# Altium footprint library Passive-Ind.PcbLib: 61 footprints (part 2 of 4)
Each footprint in its own frame and in the unit in brackets; x right, y up, seen from the top. Pads: shape width x height; smd on the part's side, far side on the other; paste and mask are expansions set on the pad; w line width, h text height; cw(c..) or ccw(c..) is an arc to the next point about the centre after c.
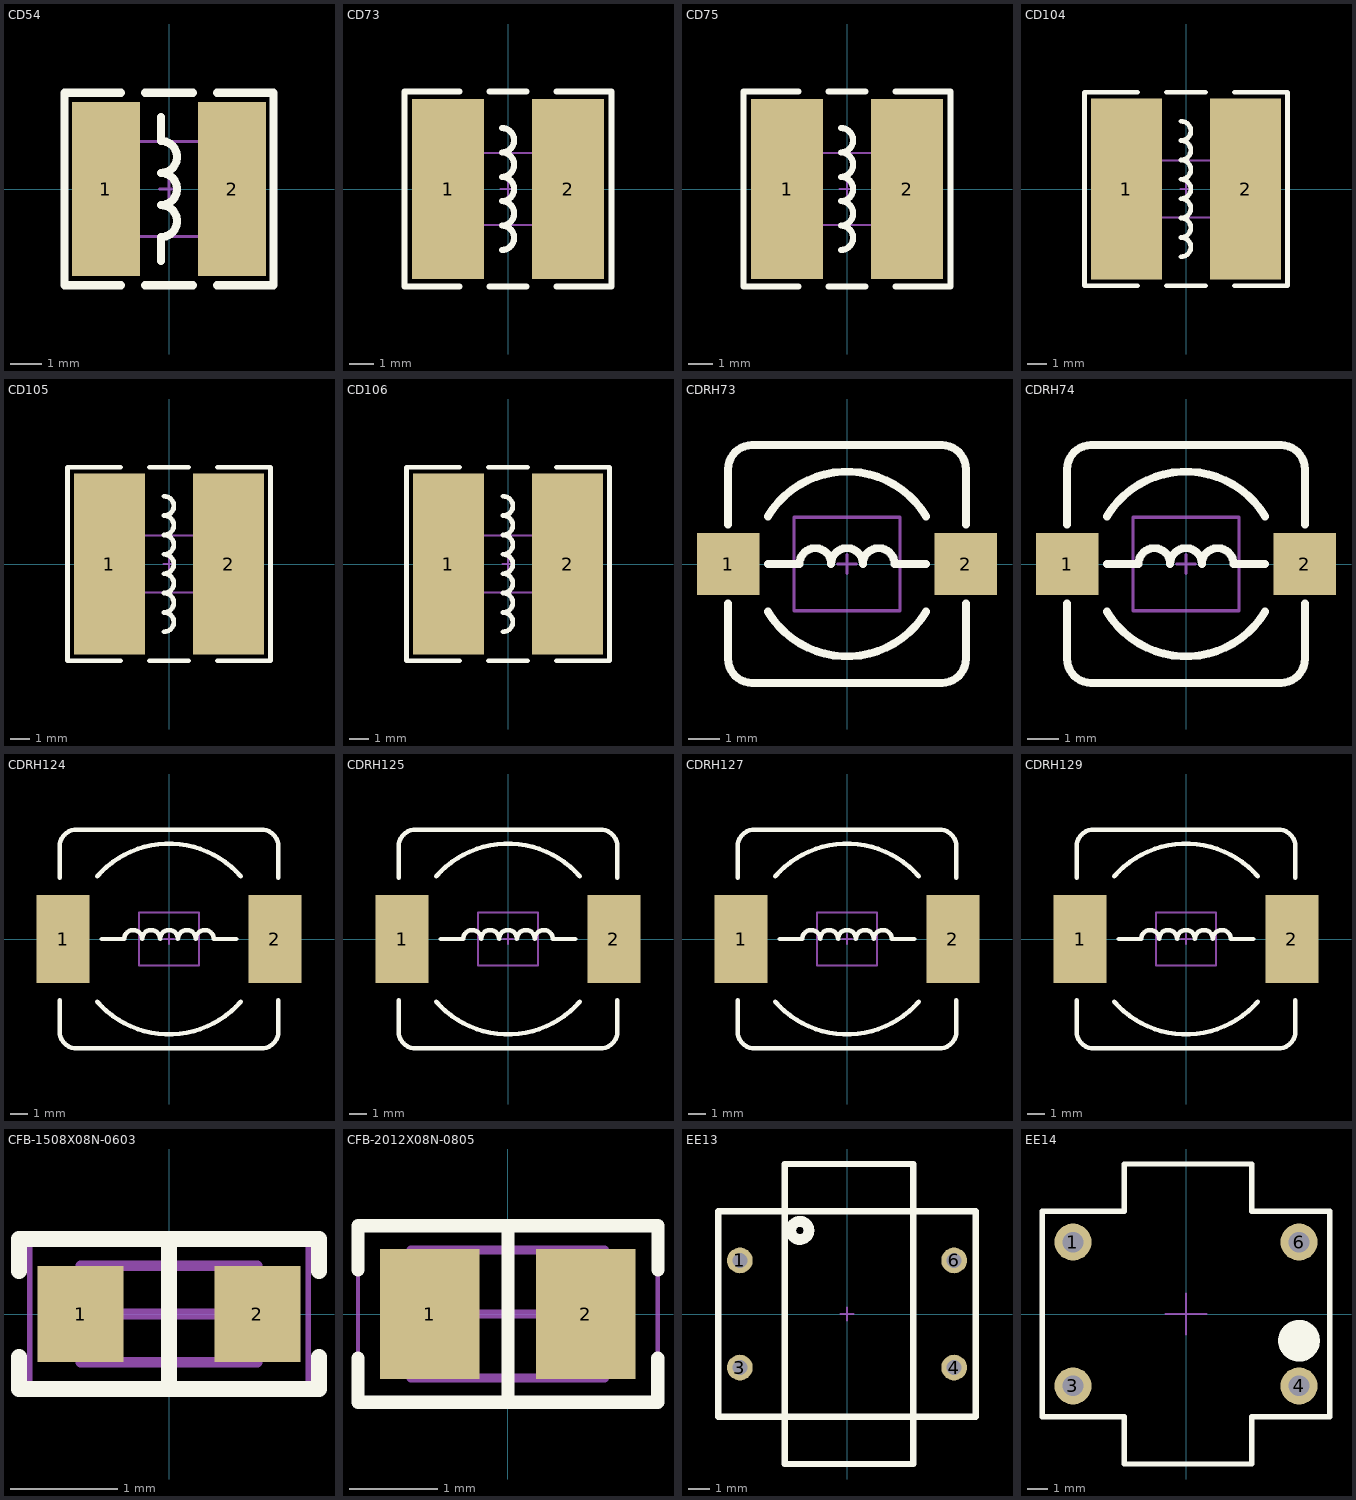
[diagram p1: the footprints below, top view; thin cyan lines are the x and y axes]

## CD54 [mm] "5.8*5.2*4.5mm（长宽高）"
pads (2):
  rect 2.15x5.5 smd: 1(-2,0) 2(2,0)
Top Overlay:
  lines w0.254: -1.524,-3.048 -3.302,-3.048 -3.302,3.048 -1.524,3.048 ; -0.762,-3.048 0.762,-3.048 ; -0.762,3.048 0.762,3.048 ; -0.254,-2.286 -0.254,-1.524 ccw(c-0.254,-1.016) -0.254,-0.508 ccw(c-0.254,0) -0.254,0.508 ccw(c-0.254,1.016) -0.254,1.524 -0.254,2.286 ; 1.524,-3.048 3.302,-3.048 3.302,3.048 1.524,3.048
Top Component Outline:
  lines w0.1: -1.7,-1.5 -1.7,1.5 1.7,1.5 1.7,-1.5 -1.7,-1.5
Top Component Center:
  lines w0.1: -0.3,0 0.3,0 ; 0,-0.3 0,0.3
Top Value:
  text "'.Comment'" at -2.754,-0.38 h1.27
Top Designator:
  text ".Designator" at -3.774,-0.319 h1.52
3D body "CD54.STEP": height 4, standoff 0, extent -2.747,-2.333 3.001,2.667

## CD73 [mm] "7.8*7*3.5mm（长宽高）"
pads (2):
  rect 3x7.5 smd: 1(-2.5,0) 2(2.5,0)
Top Overlay:
  lines w0.254: -2.032,-4.064 -4.318,-4.064 -4.318,4.064 -2.032,4.064 ; -0.762,-4.064 0.762,-4.064 ; -0.762,4.064 0.762,4.064 ; -0.254,-2.54 ccw(c-0.254,-2.032) -0.254,-1.524 ccw(c-0.254,-1.016) -0.254,-0.508 ccw(c-0.254,0) -0.254,0.508 ccw(c-0.254,1.016) -0.254,1.524 ccw(c-0.254,2.032) -0.254,2.54 ; 2.032,-4.064 4.318,-4.064 4.318,4.064 2.032,4.064
Top Component Outline:
  lines w0.1: -1.7,-1.5 -1.7,1.5 1.7,1.5 1.7,-1.5 -1.7,-1.5
Top Component Center:
  lines w0.1: -0.3,0 0.3,0 ; 0,-0.3 0,0.3
Top Value:
  text "'.Comment'" at -2.754,-0.38 h1.27
Top Designator:
  text ".Designator" at -3.774,-0.319 h1.52
3D body "CD73.STEP": height 3.75, standoff 0, extent -3.849,-3.19 3.849,3.81

## CD75 [mm] "7.8*7*5mm（长宽高）"
pads (2):
  rect 3x7.5 smd: 1(-2.5,0) 2(2.5,0)
Top Overlay:
  lines w0.254: -2.032,-4.064 -4.318,-4.064 -4.318,4.064 -2.032,4.064 ; -0.762,-4.064 0.762,-4.064 ; -0.762,4.064 0.762,4.064 ; -0.254,-2.54 ccw(c-0.254,-2.032) -0.254,-1.524 ccw(c-0.254,-1.016) -0.254,-0.508 ccw(c-0.254,0) -0.254,0.508 ccw(c-0.254,1.016) -0.254,1.524 ccw(c-0.254,2.032) -0.254,2.54 ; 2.032,-4.064 4.318,-4.064 4.318,4.064 2.032,4.064
Top Component Outline:
  lines w0.1: -1.7,-1.5 1.7,-1.5 1.7,1.5 -1.7,1.5 -1.7,-1.5
Top Component Center:
  lines w0.1: -0.3,0 0.3,0 ; 0,-0.3 0,0.3
Top Value:
  text "'.Comment'" at -2.754,-0.38 h1.27
Top Designator:
  text ".Designator" at -3.774,-0.319 h1.52
3D body "CD75.STEP": height 5.15, standoff 0, extent -3.849,-3.444 3.849,3.556

## CD104 [mm] "10*9*4mm（长宽高）"
pads (2):
  rect 3.75x9.5 smd: 1(-3.125,0) 2(3.125,0)
Top Overlay:
  lines w0.254: -2.54,-5.08 -5.334,-5.08 -5.334,5.08 -2.54,5.08 ; -1.016,-5.08 1.016,-5.08 ; -1.016,5.08 1.016,5.08 ; -0.254,-3.556 ccw(c-0.254,-3.048) -0.254,-2.54 ccw(c-0.254,-2.032) -0.254,-1.524 ccw(c-0.254,-1.016) -0.254,-0.508 ccw(c-0.254,0) -0.254,0.508 ccw(c-0.254,1.016) -0.254,1.524 ccw(c-0.254,2.032) -0.254,2.54 ccw(c-0.254,3.048) -0.254,3.556 ; 2.54,-5.08 5.334,-5.08 5.334,5.08 2.54,5.08
Top Component Outline:
  lines w0.1: -1.7,-1.5 -1.7,1.5 1.7,1.5 1.7,-1.5 -1.7,-1.5
Top Component Center:
  lines w0.1: -0.3,0 0.3,0 ; 0,-0.3 0,0.3
Top Value:
  text "'.Comment'" at -2.754,-0.38 h1.27
Top Designator:
  text ".Designator" at -3.774,-0.319 h1.52
3D body "CD104.STEP": height 4.7, standoff 0, extent -4.7,-4.174 5.208,4.826

## CD105 [mm] "10*9*5.4mm（长宽高）"
pads (2):
  rect 3.75x9.5 smd: 1(-3.125,0) 2(3.125,0)
Top Overlay:
  lines w0.254: -2.54,-5.08 -5.334,-5.08 -5.334,5.08 -2.54,5.08 ; -1.016,-5.08 1.016,-5.08 ; -1.016,5.08 1.016,5.08 ; -0.254,-3.556 ccw(c-0.254,-3.048) -0.254,-2.54 ccw(c-0.254,-2.032) -0.254,-1.524 ccw(c-0.254,-1.016) -0.254,-0.508 ccw(c-0.254,0) -0.254,0.508 ccw(c-0.254,1.016) -0.254,1.524 ccw(c-0.254,2.032) -0.254,2.54 ccw(c-0.254,3.048) -0.254,3.556 ; 2.54,-5.08 5.334,-5.08 5.334,5.08 2.54,5.08
Top Component Outline:
  lines w0.1: -1.7,-1.5 -1.7,1.5 1.7,1.5 1.7,-1.5 -1.7,-1.5
Top Component Center:
  lines w0.1: -0.3,0 0.3,0 ; 0,-0.3 0,0.3
Top Value:
  text "'.Comment'" at -2.754,-0.38 h1.27
Top Designator:
  text ".Designator" at -3.774,-0.319 h1.52
3D body "CD105.STEP": height 5.5, standoff 0, extent -5.208,-4.428 4.7,4.572

## CD106 [mm] "10*9*6.5mm（长宽高）"
pads (2):
  rect 3.75x9.5 smd: 1(-3.125,0) 2(3.125,0)
Top Overlay:
  lines w0.254: -2.54,-5.08 -5.334,-5.08 -5.334,5.08 -2.54,5.08 ; -1.016,-5.08 1.016,-5.08 ; -1.016,5.08 1.016,5.08 ; -0.254,-3.556 ccw(c-0.254,-3.048) -0.254,-2.54 ccw(c-0.254,-2.032) -0.254,-1.524 ccw(c-0.254,-1.016) -0.254,-0.508 ccw(c-0.254,0) -0.254,0.508 ccw(c-0.254,1.016) -0.254,1.524 ccw(c-0.254,2.032) -0.254,2.54 ccw(c-0.254,3.048) -0.254,3.556 ; 2.54,-5.08 5.334,-5.08 5.334,5.08 2.54,5.08
Top Component Outline:
  lines w0.1: -1.7,-1.5 -1.7,1.5 1.7,1.5 1.7,-1.5 -1.7,-1.5
Top Component Center:
  lines w0.1: -0.3,0 0.3,0 ; 0,-0.3 0,0.3
Top Value:
  text "'.Comment'" at -2.754,-0.38 h1.27
Top Designator:
  text ".Designator" at -3.774,-0.319 h1.52
3D body "CD106.STEP": height 6.3, standoff 0, extent -5.08,-4.5 4.829,4.5

## CDRH73 [mm] "7.3*7.3*3.4mm（长宽高）"
pads (2):
  rect 2x2 smd: 1(-3.81,0) 2(3.81,0)
Top Overlay:
  lines w0.254: -3.81,-1.27 -3.81,-3.048 ccw(c-3.048,-3.048) -3.048,-3.81 3.048,-3.81 ccw(c3.048,-3.048) 3.81,-3.048 3.81,-1.27 ; -3.81,1.27 -3.81,3.048 cw(c-3.048,3.048) -3.048,3.81 3.048,3.81 cw(c3.048,3.048) 3.81,3.048 3.81,1.27 ; -2.54,-1.524 ccw(c0,0) 2.54,-1.524 ; -2.54,0 -1.524,0 cw(c-1.016,0) -0.508,0 cw(c0,0) 0.508,0 cw(c1.016,0) 1.524,0 2.54,0 ; -2.54,1.524 cw(c0,0) 2.54,1.524
Top Component Outline:
  lines w0.1: -1.7,-1.5 -1.7,1.5 1.7,1.5 1.7,-1.5 -1.7,-1.5
Top Component Center:
  lines w0.1: -0.3,0 0.3,0 ; 0,-0.3 0,0.3
Top Value:
  text "'.Comment'" at -2.754,-0.38 h1.27
Top Designator:
  text ".Designator" at -3.774,-0.319 h1.52
3D body "CDRH73.STEP": height 3.65, standoff 0, extent -3.49,-3.65 3.81,3.65

## CDRH74 [mm] "7.3*7.3*4.5mm（长宽高）"
pads (2):
  rect 2x2 smd: 1(-3.81,0) 2(3.81,0)
Top Overlay:
  lines w0.254: -3.81,-1.27 -3.81,-3.048 ccw(c-3.048,-3.048) -3.048,-3.81 3.048,-3.81 ccw(c3.048,-3.048) 3.81,-3.048 3.81,-1.27 ; -3.81,1.27 -3.81,3.048 cw(c-3.048,3.048) -3.048,3.81 3.048,3.81 cw(c3.048,3.048) 3.81,3.048 3.81,1.27 ; -2.54,-1.524 ccw(c0,0) 2.54,-1.524 ; -2.54,0 -1.524,0 cw(c-1.016,0) -0.508,0 cw(c0,0) 0.508,0 cw(c1.016,0) 1.524,0 2.54,0 ; -2.54,1.524 cw(c0,0) 2.54,1.524
Top Component Outline:
  lines w0.1: -1.7,-1.5 -1.7,1.5 1.7,1.5 1.7,-1.5 -1.7,-1.5
Top Component Center:
  lines w0.1: -0.3,0 0.3,0 ; 0,-0.3 0,0.3
Top Value:
  text "'.Comment'" at -2.754,-0.38 h1.27
Top Designator:
  text ".Designator" at -3.774,-0.319 h1.52
3D body "CDRH74.STEP": height 4.5, standoff 0, extent -3.65,-3.617 3.65,3.683

## CDRH124 [mm] "12*12*4.5mm（长宽高）"
pads (2):
  rect 3x5 smd: 1(-6,0) 2(6,0)
Top Overlay:
  lines w0.254: -6.2,-3.475 -6.2,-5.23 ccw(c-5.23,-5.23) -5.23,-6.2 5.23,-6.2 ccw(c5.23,-5.23) 6.2,-5.23 6.2,-3.475 ; -6.2,3.475 -6.2,5.23 cw(c-5.23,5.23) -5.23,6.2 5.23,6.2 cw(c5.23,5.23) 6.2,5.23 6.2,3.475 ; -4.064,-3.556 ccw(c0,0) 4.064,-3.556 ; -4.064,3.556 cw(c0,0) 4.064,3.556 ; -3.81,0 -2.54,0 cw(c-2.032,0) -1.524,0 cw(c-1.016,0) -0.508,0 cw(c0,0) 0.508,0 cw(c1.016,0) 1.524,0 cw(c2.032,0) 2.54,0 3.81,0
Top Component Outline:
  lines w0.1: -1.7,-1.5 -1.7,1.5 1.7,1.5 1.7,-1.5 -1.7,-1.5
Top Component Center:
  lines w0.1: -0.3,0 0.3,0 ; 0,-0.3 0,0.3
Top Value:
  text "'.Comment'" at -2.754,-0.38 h1.27
Top Designator:
  text ".Designator" at -3.774,-0.319 h1.52
3D body "CDRH124.STEP": height 4.55, standoff 0.05, extent -5.873,-6.031 6.127,5.969

## CDRH125 [mm] "12*12*5mm（长宽高）"
pads (2):
  rect 3x5 smd: 1(-6,0) 2(6,0)
Top Overlay:
  lines w0.254: -6.2,-3.475 -6.2,-5.23 ccw(c-5.23,-5.23) -5.23,-6.2 5.23,-6.2 ccw(c5.23,-5.23) 6.2,-5.23 6.2,-3.475 ; -6.2,3.475 -6.2,5.23 cw(c-5.23,5.23) -5.23,6.2 5.23,6.2 cw(c5.23,5.23) 6.2,5.23 6.2,3.475 ; -4.064,-3.556 ccw(c0,0) 4.064,-3.556 ; -4.064,3.556 cw(c0,0) 4.064,3.556 ; -3.81,0 -2.54,0 cw(c-2.032,0) -1.524,0 cw(c-1.016,0) -0.508,0 cw(c0,0) 0.508,0 cw(c1.016,0) 1.524,0 cw(c2.032,0) 2.54,0 3.81,0
Top Component Outline:
  lines w0.1: -1.7,-1.5 1.7,-1.5 1.7,1.5 -1.7,1.5 -1.7,-1.5
Top Component Center:
  lines w0.1: -0.3,0 0.3,0 ; 0,-0.3 0,0.3
Top Value:
  text "'.Comment'" at -2.754,-0.38 h1.27
Top Designator:
  text ".Designator" at -3.774,-0.319 h1.52
3D body "CDRH125.STEP": height 5.05, standoff 0.05, extent -5.873,-5.969 6.127,6.031

## CDRH127 [mm] "12*12*8mm（长宽高）"
pads (2):
  rect 3x5 smd: 1(-6,0) 2(6,0)
Top Overlay:
  lines w0.254: -6.2,-3.475 -6.2,-5.23 ccw(c-5.23,-5.23) -5.23,-6.2 5.23,-6.2 ccw(c5.23,-5.23) 6.2,-5.23 6.2,-3.475 ; -6.2,3.475 -6.2,5.23 cw(c-5.23,5.23) -5.23,6.2 5.23,6.2 cw(c5.23,5.23) 6.2,5.23 6.2,3.475 ; -4.064,-3.556 ccw(c0,0) 4.064,-3.556 ; -4.064,3.556 cw(c0,0) 4.064,3.556 ; -3.81,0 -2.54,0 cw(c-2.032,0) -1.524,0 cw(c-1.016,0) -0.508,0 cw(c0,0) 0.508,0 cw(c1.016,0) 1.524,0 cw(c2.032,0) 2.54,0 3.81,0
Top Component Outline:
  lines w0.1: -1.7,-1.5 -1.7,1.5 1.7,1.5 1.7,-1.5 -1.7,-1.5
Top Component Center:
  lines w0.1: -0.3,0 0.3,0 ; 0,-0.3 0,0.3
Top Value:
  text "'.Comment'" at -2.754,-0.38 h1.27
Top Designator:
  text ".Designator" at -3.774,-0.319 h1.52
3D body "CDRH127.STEP": height 7.8, standoff 0, extent -5.873,-6.031 6.127,5.969

## CDRH129 [mm] "12*12*9.5mm（长宽高）"
pads (2):
  rect 3x5 smd: 1(-6,0) 2(6,0)
Top Overlay:
  lines w0.254: -6.2,-3.475 -6.2,-5.23 ccw(c-5.23,-5.23) -5.23,-6.2 5.23,-6.2 ccw(c5.23,-5.23) 6.2,-5.23 6.2,-3.475 ; -6.2,3.475 -6.2,5.23 cw(c-5.23,5.23) -5.23,6.2 5.23,6.2 cw(c5.23,5.23) 6.2,5.23 6.2,3.475 ; -4.064,-3.556 ccw(c0,0) 4.064,-3.556 ; -4.064,3.556 cw(c0,0) 4.064,3.556 ; -3.81,0 -2.54,0 cw(c-2.032,0) -1.524,0 cw(c-1.016,0) -0.508,0 cw(c0,0) 0.508,0 cw(c1.016,0) 1.524,0 cw(c2.032,0) 2.54,0 3.81,0
Top Component Outline:
  lines w0.1: -1.7,-1.5 1.7,-1.5 1.7,1.5 -1.7,1.5 -1.7,-1.5
Top Component Center:
  lines w0.1: -0.3,0 0.3,0 ; 0,-0.3 0,0.3
Top Value:
  text "'.Comment'" at -2.754,-0.38 h1.27
Top Designator:
  text ".Designator" at -3.774,-0.319 h1.52
3D body "CDRH129.STEP": height 9.65, standoff 0.05, extent -6.127,-5.904 5.873,6.096

## CFB-1508X08N-0603 [mm] "Chip Inductor, 2-Leads, Body 1.55x0.80mm, IPC Medium Density"
height 0.8
pads (2):
  rect 0.8x0.9 smd: 1(-0.825,0) 2(0.825,0)
Top Overlay:
  lines w0.15: -1.4,-0.4 -1.4,-0.7 1.4,-0.7 1.4,-0.4 ; -1.4,0.4 -1.4,0.7 1.4,0.7 1.4,0.4 ; 0,-0.7 0,0.7
Top Courtyard:
  lines w0.05: -1.3,-0.7 -1.3,0.7 1.3,0.7 1.3,-0.7 -1.3,-0.7
  lines w0.1: -0.45,0 0.45,0 ; 0,-0.45 0,0.45
Top Assembly (Mech20):
  lines w0.1: -0.825,-0.45 -0.825,0.45 0.825,0.45 0.825,-0.45 -0.825,-0.45
3D body "0603L.STEP": height 0.8, standoff 0, extent -0.8,-0.419 0.8,0.381

## CFB-2012X08N-0805 [mm] "Chip Inductor, 2-Leads, Body 2.00x1.25mm, IPC Medium Density"
height 0.85
pads (2):
  rect 1.13x1.47 smd: 1(-0.885,0) 2(0.885,0)
Top Overlay:
  lines w0.152: -1.7,-0.5 -1.7,-1 1.7,-1 1.7,-0.5 ; -1.7,0.5 -1.7,1 1.704,1 1.704,0.504 ; 0.002,-0.998 0.002,1
Top Value:
  text "'.Comment'" at -3.468,-0.479 h1.6
Top Designator:
  text ".Designator" at -3.964,-0.335 h1.6
Top Courtyard:
  lines w0.05: -1.7,-1 1.7,-1 1.7,1 -1.7,1 -1.7,-1
  lines w0.1: -0.5,0 0.5,0 ; 0,-0.5 0,0.5
Top Assembly (Mech20):
  lines w0.1: -1.1,-0.725 1.1,-0.725 1.1,0.725 -1.1,0.725 -1.1,-0.725
3D body "0805L.STEP": height 0.9, standoff 0, extent -1,-0.6 1,0.6

## EE13 [mm] "600,1:1音频变压器"
pads (4):
  round 1.2 hole 0.7: 1(-5,2.5) 3(-5,-2.5) 4(5,-2.5) 6(5,2.5)
Top Overlay:
  circle w0.5: c-2.2,3.9 r0.424
  lines w0.3: -6,-4.8 -6,4.8 6,4.8 6,-4.8 -6,-4.8 ; -2.9,-7 -2.9,7 3.1,7 3.1,-7 -2.9,-7
Top Component Outline:
  lines w0.1: -6,-4.8 -2.9,-4.8 -2.9,-7 3.1,-7 3.1,-4.8 6,-4.8 6,4.8 3.1,4.8 3.1,7 -2.9,7 -2.9,4.8 -6,4.8 -6,-4.8
Top Component Center:
  lines w0.1: -0.3,0 0.3,0 ; 0,-0.3 0,0.3
Top Value:
  text "'.Comment'" at -2.754,-0.38 h1.27
Top Designator:
  text ".Designator" at -3.774,-0.319 h1.52
3D body "EE13-T304.SLDPRT": height 12.38, standoff 0.1, extent -6.4,-6.61 6,6.61

## EE14 [mm]
pads (4):
  round 1.8 hole 1: 1(-5.5,3.5) 3(-5.5,-3.5) 4(5.5,-3.5) 6(5.5,3.5)
Top Overlay:
  circle w1.016: c5.5,-1.3 r0.508
  lines w0.254: -7,-5 -7,5 -3,5 -3,7.3 3.2,7.3 3.2,5 7,5 7,-5 3.2,-5 3.2,-7.3 -3,-7.3 -3,-5 -7,-5
Top Component Outline:
  lines w0.1: -3.05,7.25 -3.05,5 -7,5 -7,-5 -3.05,-5 -3.05,-7.3 3.15,-7.3 3.15,-5 7,-5 7,4.991 3.159,4.991 ; -3.05,7.3 3.15,7.3 ; 3.15,5 3.15,7.25
Top Component Center:
  lines w0.1: -1,0 1,0 ; 0,-1 0,1
Top Value:
  text "'.Comment'" at -3.301,-0.456 h1.52
Top Designator:
  text ".Designator" at -4.409,-0.373 h1.78
3D body "EE13-T304.SLDPRT": height 12.38, standoff 0.1, extent -6.4,-6.61 6,6.61